# Altium schematic symbol library UCP.SchLib: 378 symbols (part 1 of 14)
Pins are listed as number, name and electrical type; pins without a type are passive.

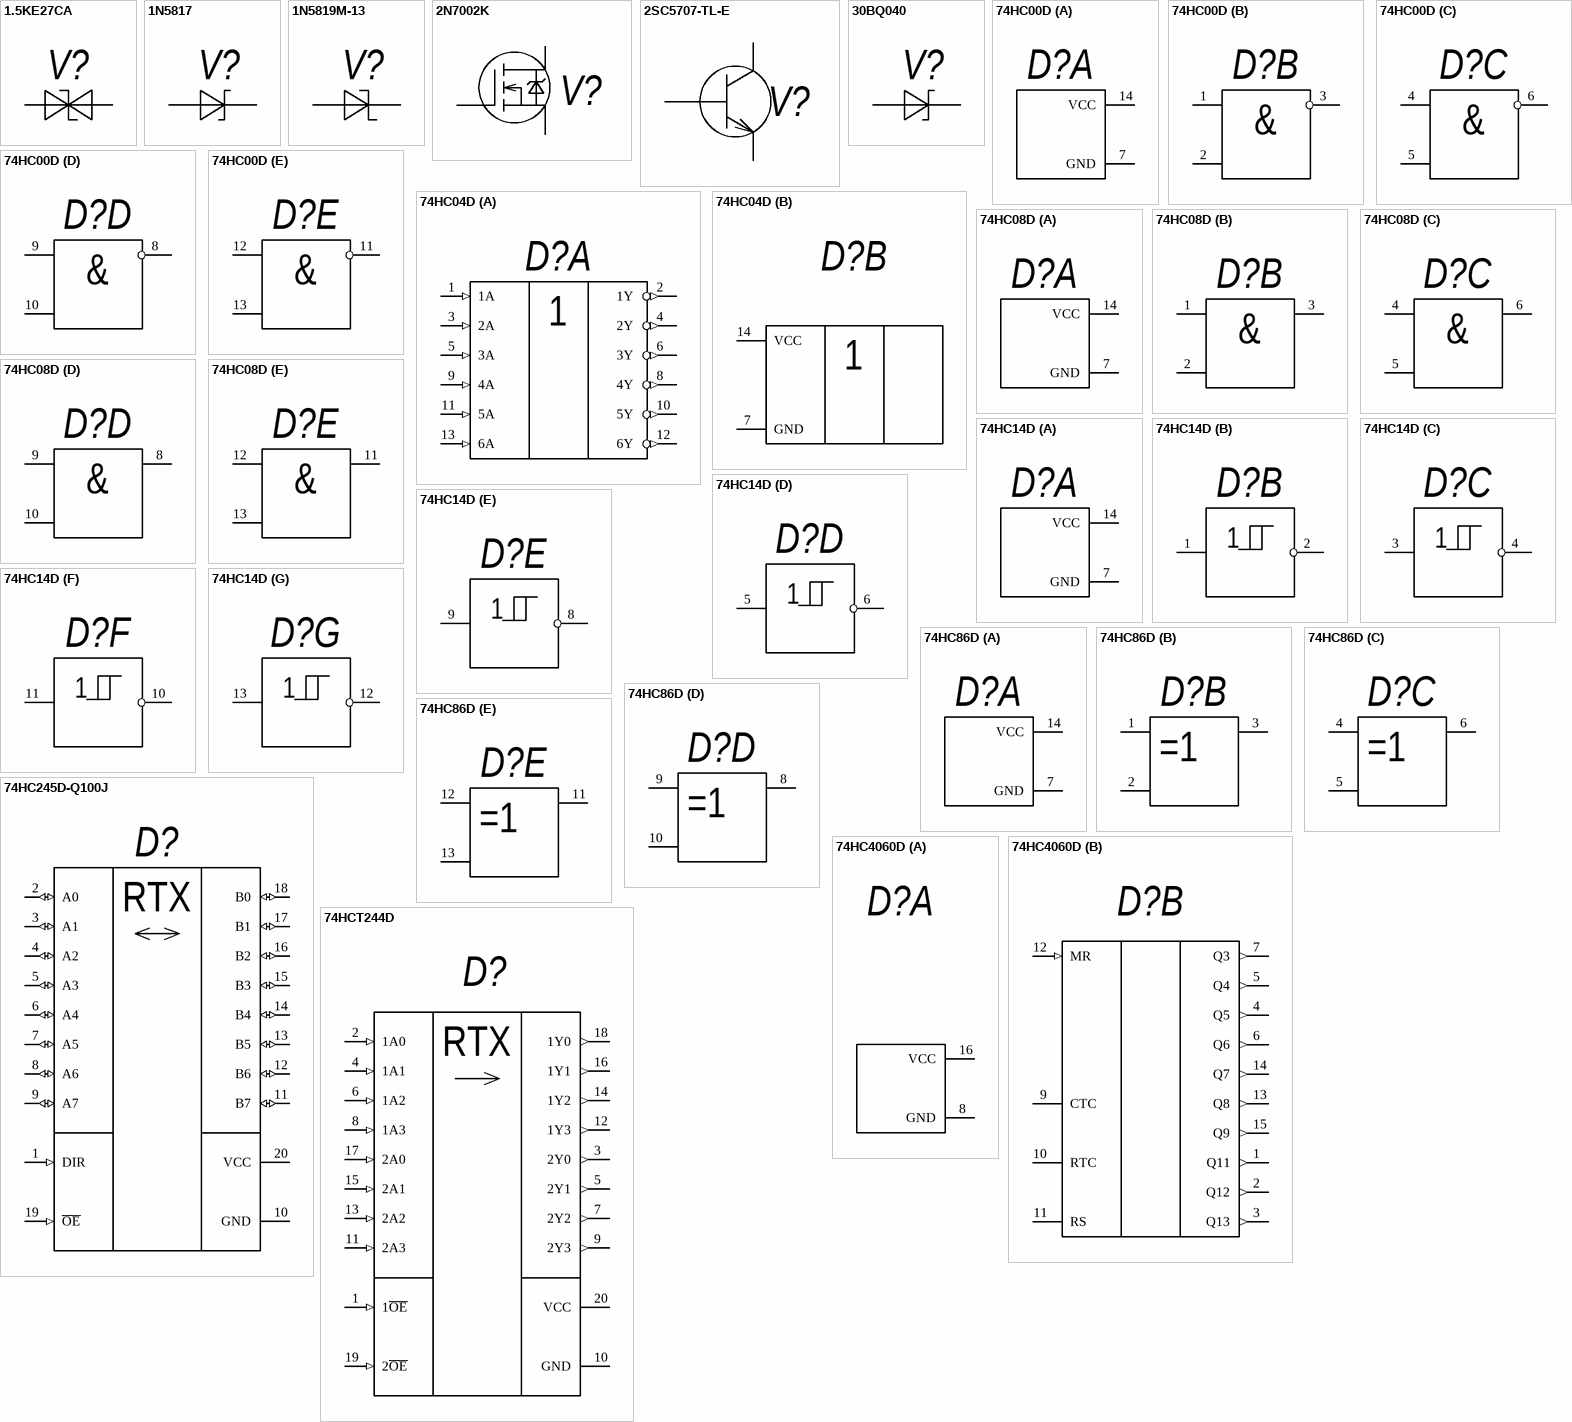
[diagram p0: symbols 1.5KE27CA to 74HCT244D]

## 1.5KE27CA
designator V?  (value not drawn)
TVS Diodes; Manufacturer 1: Littelfuse; Clamping Voltage: 37.5V; Peak Pulse Power: 1.5kW; Polarity: Bidirectional; Reverse Standoff Voltage: 23.1V; Breakdown Voltage: 25.7V; Peak Pulse Current: 40.5A; Test Current: 1mA; Max Reverse Leakage Current: 1uA; Element Configuration: Single; Number of Elements: 1; Power Line Protection: No; Diode Type: ZENER; ESD Protection: Yes; Max Power Dissipation: 6.5W; Max Breakdown Voltage: 28.4V; Value: 1.5KE27CA; Supplier 1: Arrow Electronics; Supplier Part Number 1: 1.5KE27CA; Manufacturer Part Number 1: 1.5KE27CA; RoHS: Yes; Category: TVS Diodes; Stock 1: 48; Pricing 1: 1=0,18400, 10=0,18040, 25=0,15920 (USD); Mount: THT; Case/Package: DO-201; Number of Pins: 2; Min Operating Temperature: -55°C; Max Operating Temperature: 175°C; Packaging: Tape and Reel; Package Quantity: 1200; Max Surge Current: 40.5A; Min Breakdown Voltage: 25.7V; Operating Supply Voltage: 23.1V; Direction: Bidirectional; Reverse Breakdown Voltage: 25.7V; Number of Bidirectional Channels: 1; Leakage Current: 1uA; Resistor Type: Zener; Series: 1.5KE; Termination: Axial; Number of Channels: 1; Power Dissipation: 6.5W; Diameter: 5.3mm; Length: 9.5mm; RoHS Compliant: Yes; Lead Free: Lead Free; REACH SVHC: No SVHC; ComponentLink1URL: https://datasheet.ciiva.com/28473/littelfuse-tvs-diode-1-5ke-28473077.pdf?src-supplier=Element14; ComponentLink1Description: https://datasheet.ciiva.com/28473/littelfuse-tvs-diode-1-5ke-28473077.pdf?src-supplier=Element14; ComponentLink2URL: https://datasheet.ciiva.com/332/littelfuse-tvs-diode-1-5ke-datasheet-pdf-332484.pdf?src-supplier=Digi-Key; ComponentLink2Description: https://datasheet.ciiva.com/332/littelfuse-tvs-diode-1-5ke-datasheet-pdf-332484.pdf?src-supplier=Digi-Key; ComponentLink3URL: https://datasheet.ciiva.com/332/littelfuse-tvs-diode-1-5ke-datasheet-pdf-332485.pdf?src-supplier=Digi-Key; ComponentLink3Description: https://datasheet.ciiva.com/332/littelfuse-tvs-diode-1-5ke-datasheet-pdf-332485.pdf?src-supplier=Digi-Key; ComponentLink4URL: https://datasheet.ciiva.com/1275/littelfuse-tvs-diode-1-5ke-1275437.pdf?src-supplier=Element14; ComponentLink4Description: https://datasheet.ciiva.com/1275/littelfuse-tvs-diode-1-5ke-1275437.pdf?src-supplier=Element14; Type: Диод
footprint DIONPAD1750W101L950D530 (Diode, Non-polarized, Axial; 17.50 mm Pitch X 1.015 mm W 9.50 mm L X 5.30 mm Dia. body)
pins: A, C

## 1N5817
designator V?  (value not drawn)
DIODE SCHOTTKY 40V 1A MELF; Manufacturer 1: Diodes; Manufacturer Part Number 1: 1N5819M-13; Forward Voltage: 900mV; Element Configuration: Single; Peak Non-Repetitive Surge Current: 25A; Reverse Recovery Time: 3us; Value: 5817; Supplier 1: Arrow Electronics; RoHS: No; Category: Rectifier Diodes; Mount: SMT; Case/Package: SOD-80; Number of Pins: 2; Min Operating Temperature: -60°C; Max Operating Temperature: 125°C; Packaging: Tape and Reel; Average Rectified Current: 1A; Max Reverse Voltage (DC): 40V; Series: -; Voltage Rating (DC): 40V; Current Rating: 1A; RoHS Compliant: No; Lead Free: Exempt; ComponentLink1URL: https://datasheet.ciiva.com/925/1n5817m-5818m-5819m-925412.pdf?src-supplier=Digi-Key; ComponentLink1Description: https://datasheet.ciiva.com/925/1n5817m-5818m-5819m-925412.pdf?src-supplier=Digi-Key; Supplier Part Number 1: 1N5819M-13; Supplier 2: Newark; Supplier Part Number 2: 38C7700; Type: Диод
footprint DIOMELF350X164L52N (Diode, Metal Electrode Leadless Face (MELF); 3.50 mm L X 1.645 mm Dia body)
pins: A, C

## 1N5819M-13
designator V?, comment Обозначение при заказе  (value not drawn)
DIODE SCHOTTKY 40V 1A MELF; Manufacturer 1: Diodes; Manufacturer Part Number 1: 1N5819M-13; Forward Voltage: 900mV; Element Configuration: Single; Peak Non-Repetitive Surge Current: 25A; Reverse Recovery Time: 3us; Value: 5819; Supplier 1: Arrow Electronics; RoHS: No; Category: Rectifier Diodes; Mount: SMT; Case/Package: SOD-80; Number of Pins: 2; Min Operating Temperature: -60°C; Max Operating Temperature: 125°C; Packaging: Tape and Reel; Average Rectified Current: 1A; Max Reverse Voltage (DC): 40V; Series: -; Voltage Rating (DC): 40V; Current Rating: 1A; RoHS Compliant: No; Lead Free: Exempt; ComponentLink1URL: https://datasheet.ciiva.com/925/1n5817m-5818m-5819m-925412.pdf?src-supplier=Digi-Key; ComponentLink1Description: https://datasheet.ciiva.com/925/1n5817m-5818m-5819m-925412.pdf?src-supplier=Digi-Key; Supplier Part Number 1: 1N5819M-13; Type: Диод
footprint DIOMELF350X164L52N (Diode, Metal Electrode Leadless Face (MELF); 3.50 mm L X 1.645 mm Dia body)
pins: A, C

## 2N7002K
designator V?  (value not drawn)
N-Channel 60 V (D-S) MOSFET; Case/Package: SOT-23-3; Mount: SMT; Type: Транзистор; Value: 2N7002K
footprint SOT23-3P95_240X110L25X60N (Small Outline Transistor (SOT23), 0.95 mm pitch; 3 pin, 2.90 mm L X 1.30 mm W X 1.10 mm H body)
footprint SOT23-3P95_240X110L30X43N (Small Outline Transistor (SOT23), 0.95 mm pitch; 3 pin, 2.90 mm L X 1.30 mm W X 1.10 mm H body)
pins: 1 G, 2 S, 3 D

## 2SC5707-TL-E
designator V?  (value not drawn)
nPN Bipolar Transistor 50V 8A; Manufacturer 1: Diodes; Manufacturer Part Number 1: MMBT4401-7-F; Max Power Dissipation: 300mW; Collector Emitter Voltage (VCEO): 40V; Max Collector Current: 600mA; Collector Base Voltage (VCBO): 60V; Emitter Base Voltage (VEBO): 6V; Element Configuration: Single; Gain Bandwidth Product: 250MHz; hFE Min: 100; Power Dissipation: 310mW; Collector-emitter Voltage-Max: 750mV; Number of Elements: 1; ComponentLink1URL: https://assets.nexperia.com/documents/data-sheet/BCP56_BCX56_BC56PA.pdf?src-supplier=Digi-Key; ComponentLink1Description: https://assets.nexperia.com/documents/data-sheet/BCP56_BCX56_BC56PA.pdf?src-supplier=Digi-Key; Case/Package: TO-252; Mount: SMT; Type: Транзистор; Value: 2SC5707; RoHS 1: Yes; Category: BJTs; Stock 1: 42810; Pricing 1: 5=0,15400, 10=0,14600, 100=0,07920, 500=0,04950 (EUR); Number of Pins: 4; Weight: 0.000282oz; Contact Plating: Tin,Matte; Min Operating Temperature: -55°C; Max Operating Temperature: 150°C; Packaging: Tape and Reel; Polarity: NPN; Collector Emitter Breakdown Voltage: 40V; Package Quantity: 3000; Voltage Rating (DC): 40V; Transition Frequency: 250MHz; Series: Automotive, AEC-Q101; Frequency: 250MHz; Collector Emitter Saturation Voltage: 750mV; Max Breakdown Voltage: 40V; Max Frequency: 250MHz; Continuous Collector Current: 600mA; Length: 3.05mm; Width: 1.4mm; Height: 1mm; Radiation Hardening: No; Lead Free: Lead Free; RoHS Compliant: Yes; Reach SVHC Compliant: Yes; ComponentLink2URL: https://datasheet.ciiva.com/15139/getdatasheetpartid-91436-15139165.pdf?src-supplier=Verical; ComponentLink2Description: https://datasheet.ciiva.com/15139/getdatasheetpartid-91436-15139165.pdf?src-supplier=Verical; ComponentLink3URL: https://datasheet.ciiva.com/11201/ds30039-11201820.pdf?src-supplier=Avnet; ComponentLink3Description: https://datasheet.ciiva.com/11201/ds30039-11201820.pdf?src-supplier=Avnet; ComponentLink4URL: https://datasheet.ciiva.com/16199/ds30039-16199054.pdf?src-supplier=Future+Electronics; ComponentLink4Description: https://datasheet.ciiva.com/16199/ds30039-16199054.pdf?src-supplier=Future+Electronics; ComponentLink5URL: https://datasheet.ciiva.com/972/ds30039-972548.pdf?src-supplier=Digi-Key; ComponentLink5Description: https://datasheet.ciiva.com/972/ds30039-972548.pdf?src-supplier=Digi-Key; ComponentLink6URL: https://datasheet.ciiva.com/972/ds30039-972549.pdf?src-supplier=Digi-Key; ComponentLink6Description: https://datasheet.ciiva.com/972/ds30039-972549.pdf?src-supplier=Digi-Key; ComponentLink7URL: https://datasheet.ciiva.com/972/ds30039-972547.pdf?src-supplier=Digi-Key; ComponentLink7Description: https://datasheet.ciiva.com/972/ds30039-972547.pdf?src-supplier=Digi-Key; Supplier 1: Farnell; Supplier Part Number 1: 2627952; Supplier 2: Farnell; Supplier Part Number 2: 2627952RL; Supplier 3: Avnet; Supplier Part Number 3: 2SC5707-TL-E; Supplier 4: Newark; Supplier Part Number 4: 99AC6863
footprint DPAK4P229_990X238L159X76T520X546N (DPAK, 2.29 mm pitch; 2 pin, 6.095 mm L X 6.54 mm W X 2.38 mm H body)
pins: 1 B, 3 E, 4 C

## 30BQ040
designator V?  (value not drawn)
DIODE SCHOTTKY 40V 3A MELF; Mount: SMT; Case/Package: SMC; ComponentLink1URL: https://datasheet.ciiva.com/925/1n5817m-5818m-5819m-925412.pdf?src-supplier=Digi-Key; ComponentLink1Description: https://datasheet.ciiva.com/925/1n5817m-5818m-5819m-925412.pdf?src-supplier=Digi-Key; Type: Диод; Value: 30BQ040; Supplier 1: Rs; Supplier Part Number 1: 6880512P; Supplier 2: Farnell; Supplier Part Number 2: 2630386
footprint DIOM794X590X262L114X305M (Diode, Molded Body; 6.855 mm L X 5.905 mm W X 2.62 mm H body)
pins: A, C

## 74HC00D
designator D?  (value not drawn)
IC GATE NAND 4CH 2-INP 14-SOIC; Manufacturer 1: Texas Instruments; Manufacturer Part Number 1: SN74HC00DR; Propagation Delay: 15ns; Output Current: 25mA; Logic Function: NAND GATE; Max Supply Voltage: 6V; Min Supply Voltage: 2V; Number of Circuits: 4; Quiescent Current: 2uA; High Level Output Current: -5.2mA; Low Level Output Current: 5.2mA; Number of Inputs: 2; Number of Outputs: 1; Operating Supply Voltage: 5V; Turn-On Delay Time: 23ns; Schmitt Trigger Input: No; Type: Микросхема; Value: 74HC00; Supplier 1: Mouser; Supplier Part Number 1: 595-SN74HC00DR; RoHS 1: Yes; Category: Logic Gates; Pricing 1: 1=0,41000, 10=0,33400, 50=0,33400, 100=0,20600, 1000=0,12800, 10000=0,11700 (USD); Mount: SMT; Case/Package: SOIC-14; Number of Pins: 14; Weight: 0.004318oz; Contact Plating: Tin; Min Operating Temperature: -40°C; Max Operating Temperature: 85°C; Packaging: Tape and Reel; Number of Gates: 4; Package Quantity: 1; Number of Elements: 4; Number of Input Lines: 2; Number of Output Lines: 1; Number of Bits: 4; Length: 8.65mm; Width: 3.91mm; Height: 1.58mm; Radiation Hardening: No; RoHS Compliant: Yes; Lead Free: Lead Free; REACH SVHC: No SVHC; ComponentLink1URL: https://datasheet.ciiva.com/7358/sn54hc00-7358904.pdf?src-supplier=Newark; ComponentLink1Description: https://datasheet.ciiva.com/7358/sn54hc00-7358904.pdf?src-supplier=Newark; ComponentLink2URL: https://datasheet.ciiva.com/34301/914531-34301752.pdf?src-supplier=Jameco; ComponentLink2Description: https://datasheet.ciiva.com/34301/914531-34301752.pdf?src-supplier=Jameco; ComponentLink3URL: https://datasheet.ciiva.com/15090/getdatasheetpartid-90695-15090677.pdf?src-supplier=Verical; ComponentLink3Description: https://datasheet.ciiva.com/15090/getdatasheetpartid-90695-15090677.pdf?src-supplier=Verical; ComponentLink4URL: https://datasheet.ciiva.com/46393/1882686-46393799.pdf?src-supplier=Element14; ComponentLink4Description: https://datasheet.ciiva.com/46393/1882686-46393799.pdf?src-supplier=Element14; ComponentLink5URL: https://datasheet.ciiva.com/1864/sn74hc00-1864711.pdf?src-supplier=Digi-Key; ComponentLink5Description: https://datasheet.ciiva.com/1864/sn74hc00-1864711.pdf?src-supplier=Digi-Key; ComponentLink6URL: https://datasheet.ciiva.com/1864/sn74hc00-1864710.pdf?src-supplier=Digi-Key; ComponentLink6Description: https://datasheet.ciiva.com/1864/sn74hc00-1864710.pdf?src-supplier=Digi-Key; ComponentLink7URL: https://datasheet.ciiva.com/1864/sn74hc00-1864712.pdf?src-supplier=Digi-Key; ComponentLink7Description: https://datasheet.ciiva.com/1864/sn74hc00-1864712.pdf?src-supplier=Digi-Key; ComponentLink8URL: https://datasheet.ciiva.com/14290/sn54hc00-sp-14290488.pdf?src-supplier=Avnet; ComponentLink8Description: https://datasheet.ciiva.com/14290/sn54hc00-sp-14290488.pdf?src-supplier=Avnet; ComponentLink9URL: https://datasheet.ciiva.com/14290/sn54hc00-sp-14290486.pdf?src-supplier=Avnet; ComponentLink9Description: https://datasheet.ciiva.com/14290/sn54hc00-sp-14290486.pdf?src-supplier=Avnet
footprint SOIC14P127_865X600X175L83X42N (Small Outline IC (SOIC), 1.27 mm pitch; 14 pin, 8.65 mm L X 3.90 mm W X 1.75 mm H body)
footprint SOIC14P127_865X600X175L65X42N (Small Outline IC (SOIC), 1.27 mm pitch; 14 pin, 8.65 mm L X 3.90 mm W X 1.75 mm H body)
part A pins: 7 GND (power) "Ground (0 V)", 14 VCC (power) "Supply Voltage"
part B pins: 1 1A "Data Input", 2 1B "Data Input", 3 1Y "Data Output"
part C pins: 4 2A "Data Input", 5 2B "Data Input", 6 2Y "Data Output"
part D pins: 8 3Y "Data Output", 9 3A "Data Input", 10 3B "Data Input"
part E pins: 11 4Y "Data Output", 12 4A "Data Input", 13 4B "Data Input"
part B text: &
part C text: &
part D text: &
part E text: &

## 74HC04D
designator D?, comment 74HC04D,653  (value not drawn)
The 74HC04; 74HCT04 is a hex inverter; Manufacturer 1: Nexperia; Type: Микросхема; ComponentLink1URL: https://datasheet.ciiva.com/15127/getdatasheetpartid-107342-15127132.pdf?src-supplier=Verical; ComponentLink1Description: https://datasheet.ciiva.com/15127/getdatasheetpartid-107342-15127132.pdf?src-supplier=Verical; ComponentLink2URL: https://datasheet.ciiva.com/2980/74hc-hct4067-2980453.pdf?src-supplier=Avnet; ComponentLink2Description: https://datasheet.ciiva.com/2980/74hc-hct4067-2980453.pdf?src-supplier=Avnet; ComponentLink3URL: https://datasheet.ciiva.com/16637/74hc-hct4067-16637879.pdf?src-supplier=Avnet+Europe; ComponentLink3Description: https://datasheet.ciiva.com/16637/74hc-hct4067-16637879.pdf?src-supplier=Avnet+Europe; Supplier 1: Arrow Electronics; Supplier Part Number 1: 74HC04D,653; Manufacturer Part Number 1: 74HC04D,653; RoHS: Yes; Category: Logic Gates; Stock 1: 10000; Pricing 1: 2500=0,08210 (USD); RoHS Compliant: Yes; Case/Package: SOIC-14; Mount: SMT; Value: 74HC04
footprint SOIC14P127_865X600X175L83X42N (Small Outline IC (SOIC), 1.27 mm pitch; 14 pin, 8.65 mm L X 3.90 mm W X 1.75 mm H body)
footprint SOIC14P127_865X600X175L65X42N (Small Outline IC (SOIC), 1.27 mm pitch; 14 pin, 8.65 mm L X 3.90 mm W X 1.75 mm H body)
part A pins: 1 1A (in) "data input", 2 1Y (out) "Data Output", 3 2A (in) "data input", 4 2Y (out) "Data Output", 5 3A (in) "data input", 6 3Y (out) "Data Output", 8 4Y (out) "Data Output", 9 4A (in) "data input", 10 5Y (out) "Data Output", 11 5A (in) "data input", 12 6Y (out) "Data Output", 13 6A (in) "data input"
part B pins: 7 GND (power) "Ground (0 V)", 14 VCC (power) "Supply Voltage"

## 74HC08D
designator D?  (value not drawn)
IC GATE AND 4CH 2-INP 14-SOIC; Manufacturer 1: Texas Instruments; Manufacturer Part Number 1: SN74HC08DR; Max Supply Voltage: 6V; Min Supply Voltage: 2V; Output Current: 25mA; Propagation Delay: 17ns; Number of Gates: 4; Low Level Output Current: 5.2mA; High Level Output Current: -5.2mA; Logic Function: AND GATE; Quiescent Current: 2uA; Number of Inputs: 2; Number of Outputs: 1; Operating Supply Voltage: 5V; Turn-On Delay Time: 21ns; Type: Микросхема; Value: 74HC08; Supplier 1: Mouser; Supplier Part Number 1: 595-SN74HC08DR; RoHS 1: Yes; Category: Logic Gates; Pricing 1: 1=0,41000, 10=0,33400, 50=0,33400, 100=0,20600, 500=0,17100, 1000=0,12800, 2500=0,11700, 10000=0,11700 (USD); Mount: SMT; Case/Package: SOIC-14; Number of Pins: 14; Weight: 0.004318oz; Contact Plating: Gold; Min Operating Temperature: -40°C; Max Operating Temperature: 85°C; Packaging: Tape and Reel; Number of Circuits: 4; Package Quantity: 1; Number of Elements: 4; Number of Input Lines: 2; Number of Output Lines: 1; Number of Bits: 4; Radiation Hardening: No; Lead Free: Lead Free; RoHS Compliant: Yes; REACH SVHC: No SVHC; ComponentLink1URL: https://datasheet.ciiva.com/46393/1882760-46393782.pdf?src-supplier=Element14; ComponentLink1Description: https://datasheet.ciiva.com/46393/1882760-46393782.pdf?src-supplier=Element14; ComponentLink2URL: https://datasheet.ciiva.com/46393/1882760-46393832.pdf?src-supplier=Element14; ComponentLink2Description: https://datasheet.ciiva.com/46393/1882760-46393832.pdf?src-supplier=Element14; ComponentLink3URL: https://datasheet.ciiva.com/1864/sn74hc08-1864669.pdf?src-supplier=Digi-Key; ComponentLink3Description: https://datasheet.ciiva.com/1864/sn74hc08-1864669.pdf?src-supplier=Digi-Key; ComponentLink4URL: https://datasheet.ciiva.com/1864/sn74hc08-1864668.pdf?src-supplier=Digi-Key; ComponentLink4Description: https://datasheet.ciiva.com/1864/sn74hc08-1864668.pdf?src-supplier=Digi-Key; ComponentLink5URL: https://datasheet.ciiva.com/1864/sn74hc08-1864670.pdf?src-supplier=Digi-Key; ComponentLink5Description: https://datasheet.ciiva.com/1864/sn74hc08-1864670.pdf?src-supplier=Digi-Key; ComponentLink6URL: https://datasheet.ciiva.com/7949/1882760-7949053.pdf?src-supplier=Element14; ComponentLink6Description: https://datasheet.ciiva.com/7949/1882760-7949053.pdf?src-supplier=Element14; ComponentLink7URL: https://datasheet.ciiva.com/14290/sn54hc08-sp-14290521.pdf?src-supplier=Avnet; ComponentLink7Description: https://datasheet.ciiva.com/14290/sn54hc08-sp-14290521.pdf?src-supplier=Avnet; ComponentLink8URL: https://datasheet.ciiva.com/14290/sn54hc08-sp-14290518.pdf?src-supplier=Avnet; ComponentLink8Description: https://datasheet.ciiva.com/14290/sn54hc08-sp-14290518.pdf?src-supplier=Avnet
footprint SOIC14P127_865X600X175L83X42N (Small Outline IC (SOIC), 1.27 mm pitch; 14 pin, 8.65 mm L X 3.90 mm W X 1.75 mm H body)
footprint SOIC14P127_865X600X175L65X42N (Small Outline IC (SOIC), 1.27 mm pitch; 14 pin, 8.65 mm L X 3.90 mm W X 1.75 mm H body)
part A pins: 7 GND (power) "Ground (0 V)", 14 VCC (power) "Supply Voltage"
part B pins: 1 1A "Data Input", 2 1B "Data Input", 3 1Y "Data Output"
part C pins: 4 2A "Data Input", 5 2B "Data Input", 6 2Y "Data Output"
part D pins: 8 3Y "Data Output", 9 3A "Data Input", 10 3B "Data Input"
part E pins: 11 4Y "Data Output", 12 4A "Data Input", 13 4B "Data Input"
part B text: &
part C text: &
part D text: &
part E text: &

## 74HC14D
designator D?, comment 74HC14D,653  (value not drawn)
Inverter IC 6 Channel Schmitt Trigger 14-SO; Manufacturer 1: Nexperia; Type: Микросхема; Value: 74HC14; Supplier 1: Newark; Supplier Part Number 1: 26M7759; Manufacturer Part Number 1: 74HC14D,653; RoHS 1: Yes; Category: Logic Gates; Stock 1: 70959; Pricing 1: 1=0,17200 (USD); RoHS Compliant: Yes; ComponentLink1URL: http://www.farnell.com/datasheets/2000343.pdf?src-supplier=Farnell; ComponentLink1Description: http://www.farnell.com/datasheets/2000343.pdf?src-supplier=Farnell; ComponentLink2URL: https://assets.nexperia.com/documents/data-sheet/74HC_HCT14.pdf?src-supplier=Digi-Key; ComponentLink2Description: https://assets.nexperia.com/documents/data-sheet/74HC_HCT14.pdf?src-supplier=Digi-Key; ComponentLink3URL: http://www.farnell.com/datasheets/2000343.pdf?src-supplier=Newark; ComponentLink3Description: http://www.farnell.com/datasheets/2000343.pdf?src-supplier=Newark; Case/Package: SOIC-14; Mount: SMT
footprint SOIC14P127_865X600X175L83X42N (Small Outline IC (SOIC), 1.27 mm pitch; 14 pin, 8.65 mm L X 3.90 mm W X 1.75 mm H body)
footprint SOIC14P127_865X600X175L65X42N (Small Outline IC (SOIC), 1.27 mm pitch; 14 pin, 8.65 mm L X 3.90 mm W X 1.75 mm H body)
part A pins: 7 GND (power) "Ground (0 V)", 14 VCC (power) "Supply Voltage"
part B pins: 1 1A "Data Input", 2 1Y "Назначение вывода"
part C pins: 3 2A "Data Input", 4 2Y "Data Output"
part D pins: 5 3A "Data Input", 6 3Y "Data Output"
part E pins: 8 4Y "Data Output", 9 4A "Data Input"
part F pins: 10 5Y "Data Output", 11 5A "Data Input"
part G pins: 12 6Y "Data Output", 13 6A "Data Input"

## 74HC86D
designator D?  (value not drawn)
LOGIC, XOR GATE, QUAD, SOIC-14; Logic Type: XOR Gate; No. of Inputs: 2; Supply Vol; Manufacturer 1: Philips; Manufacturer Part Number 1: 74HC86D,653; Category 1: Logic Gates; Number of Gates: 4; Output Current: 5.2mA; Type: Микросхема; Value: 74HC86; Supplier 1: Avnet; Supplier Part Number 1: 74HC86D653; RoHS 1: No; Case/Package: SOIC-14; Number of Pins: 14; Logic Function: XOR GATE; Packaging: Tape and Reel; REACH SVHC: No SVHC; Lead Free: Lead Free; Mount: SMT
footprint SOIC14P127_865X600X175L83X42N (Small Outline IC (SOIC), 1.27 mm pitch; 14 pin, 8.65 mm L X 3.90 mm W X 1.75 mm H body)
footprint SOIC14P127_865X600X175L65X42N (Small Outline IC (SOIC), 1.27 mm pitch; 14 pin, 8.65 mm L X 3.90 mm W X 1.75 mm H body)
part A pins: 7 GND (power) "Ground (0 V)", 14 VCC (power) "Supply Voltage"
part B pins: 1 1A "Data Input", 2 1B "Data Input", 3 1Y "Data Output"
part C pins: 4 2A "Data Input", 5 2B "Data Input", 6 2Y "Data Output"
part D pins: 8 3Y "Data Output", 9 3A "Data Input", 10 3B "Data Input"
part E pins: 11 4Y "Data Output", 12 4A "Data Input", 13 4B "Data Input"

## 74HC245D-Q100J
designator D?  (value not drawn)
Octal bus transceiver; 3-state; Type: Микросхема; Supplier 1: Digi-Key; Supplier 2: Digi-Key; Supplier 3: Mouser; Supplier Part Number 1: 296-1197-1-ND; Supplier Part Number 2: 296-1197-5-ND; Supplier Part Number 3: 771-74HC245DQ100J; Case/Package: SOIC-20; Mount: SMT; Value: 74HC245
footprint SOIC20P127_1280X1031X265L83X41N (Small Outline IC (SOIC), 1.27 mm pitch; 20 pin, 12.80 mm L X 7.50 mm W X 2.65 mm H body)
pins: 1 DIR (in) "Управление направлением", 2 A0 (io) "Канал 1", 3 A1 (io) "Управление направлением", 4 A2 (io) "Управление направлением", 5 A3 (io) "Управление направлением", 6 A4 (io) "Управление направлением", 7 A5 (io) "Управление направлением", 8 A6 (io) "Управление направлением", 9 A7 (io) "Управление направлением", 10 GND (power), 11 B7 (io) "GND", 12 B6 (io) "GND", 13 B5 (io) "GND", 14 B4 (io) "GND", 15 B3 (io) "GND", 16 B2 (io) "GND", 17 B1 (io) "GND", 18 B0 (io) "GND", 19 ~{OE} (in) "GND", 20 VCC (power) "Vcc"
1 alternate drawing of the same symbol
text: RTX

## 74HC4060D
designator D?  (value not drawn)
NEXPERIA - 74HC4060D,652 - 14 STAGE BINARY RIPPLE COUNTER, SOIC-16; Manufacturer 1: NXP Semiconductors; Manufacturer Part Number 1: 74HC4060D652; Operating Supply Voltage: 5V; Number of Elements: 1; Propagation Delay: 450ns; Min Supply Voltage: 2V; Max Supply Voltage: 6V; Direction: Unidirectional; Number of Bits: 14; Frequency: 95MHz; Reset: Asynchronous; Clock Edge Trigger Type: Negative Edge; Type: Микросхема; Supplier 1: Allied Electronics; Supplier Part Number 1: 70012399; RoHS 1: Yes; Category: Counters; Case/Package: SOIC-16; Number of Pins: 16; Weight: 0.25lb; Min Operating Temperature: -40°C; Max Operating Temperature: 125°C; Packaging: Bulk; Package Quantity: 1000; Logic Function: Counter; Number of Bits per Element: 14; Turn-On Delay Time: 450ns; Technology: CMOS; Number of Functions: 1; Supply Voltage-Nom: 6V; Length: 10mm; Width: 4mm; Height: 1.45mm; Radiation Hardening: No; Lead Free: Lead Free; ComponentLink1URL: https://datasheet.ciiva.com/16215/74hc-hct4060-16215998.pdf?src-supplier=Future+Electronics; ComponentLink1Description: https://datasheet.ciiva.com/16215/74hc-hct4060-16215998.pdf?src-supplier=Future+Electronics; Mount: SMT; Value: 74HC4060
footprint SOIC16P127_990X600X175L83X42N (Small Outline IC (SOIC), 1.27 mm pitch; 16 pin, 9.90 mm L X 3.90 mm W X 1.75 mm H body)
footprint SOIC16P127_990X600X175L65X42N (Small Outline IC (SOIC), 1.27 mm pitch; 16 pin, 9.90 mm L X 3.90 mm W X 1.75 mm H body)
part A pins: 8 GND (power) "Ground (0 V)", 16 VCC (power) "Supply Voltage"
part B pins: 1 Q11 (out) "Counter Output", 2 Q12 (out) "Counter Output", 3 Q13 (out) "Counter Output", 4 Q5 (out) "Counter Output", 5 Q4 (out) "Counter Output", 6 Q6 (out) "Counter Output", 7 Q3 (out) "Counter Output", 9 CTC "External Capacitor Connection", 10 RTC "External Resistor Connection", 11 RS "Clock Input/Oscillator Pin", 12 MR (in) "Master Reset Input (Active HIGH)", 13 Q8 (out) "Counter Output", 14 Q7 (out) "Counter Output", 15 Q9 (out) "Counter Output"

## 74HCT244D
designator D?  (value not drawn)
Octal buffer/line driver; 3-state; Type: Микросхема; Value: 74HTC244; Case/Package: SOIC-20; Mount: SMT; Supplier 1: Rs; Supplier Part Number 1: 1707989
footprint SOIC20P127_1280X1031X265L83X41N (Small Outline IC (SOIC), 1.27 mm pitch; 20 pin, 12.80 mm L X 7.50 mm W X 2.65 mm H body)
footprint SOIC20P127_1280X1031X265L65X42N (Small Outline IC (SOIC), 1.27 mm pitch; 20 pin, 12.80 mm L X 7.50 mm W X 2.65 mm H body)
pins: 1 1~{OE} (in) "output enable input (active LOW)", 2 1A0 (in) "Канал 1", 3 2Y0 (out) "bus output", 4 1A1 (in) "Управление направлением", 5 2Y1 (out) "bus output", 6 1A2 (in) "data input", 7 2Y2 (out) "bus output", 8 1A3 (in) "data input", 9 2Y3 (out) "bus output", 10 GND (power), 11 2A3 (in) "GND", 12 1Y3 (out) "bus output", 13 2A2 (in) "GND", 14 1Y2 (out) "bus output", 15 2A1 (in) "GND", 16 1Y1 (out) "bus output", 17 2A0 (in) "data input", 18 1Y0 (out) "bus output", 19 2~{OE} (in) "output enable input (active LOW)", 20 VCC (power) "Vcc"
text: RTX

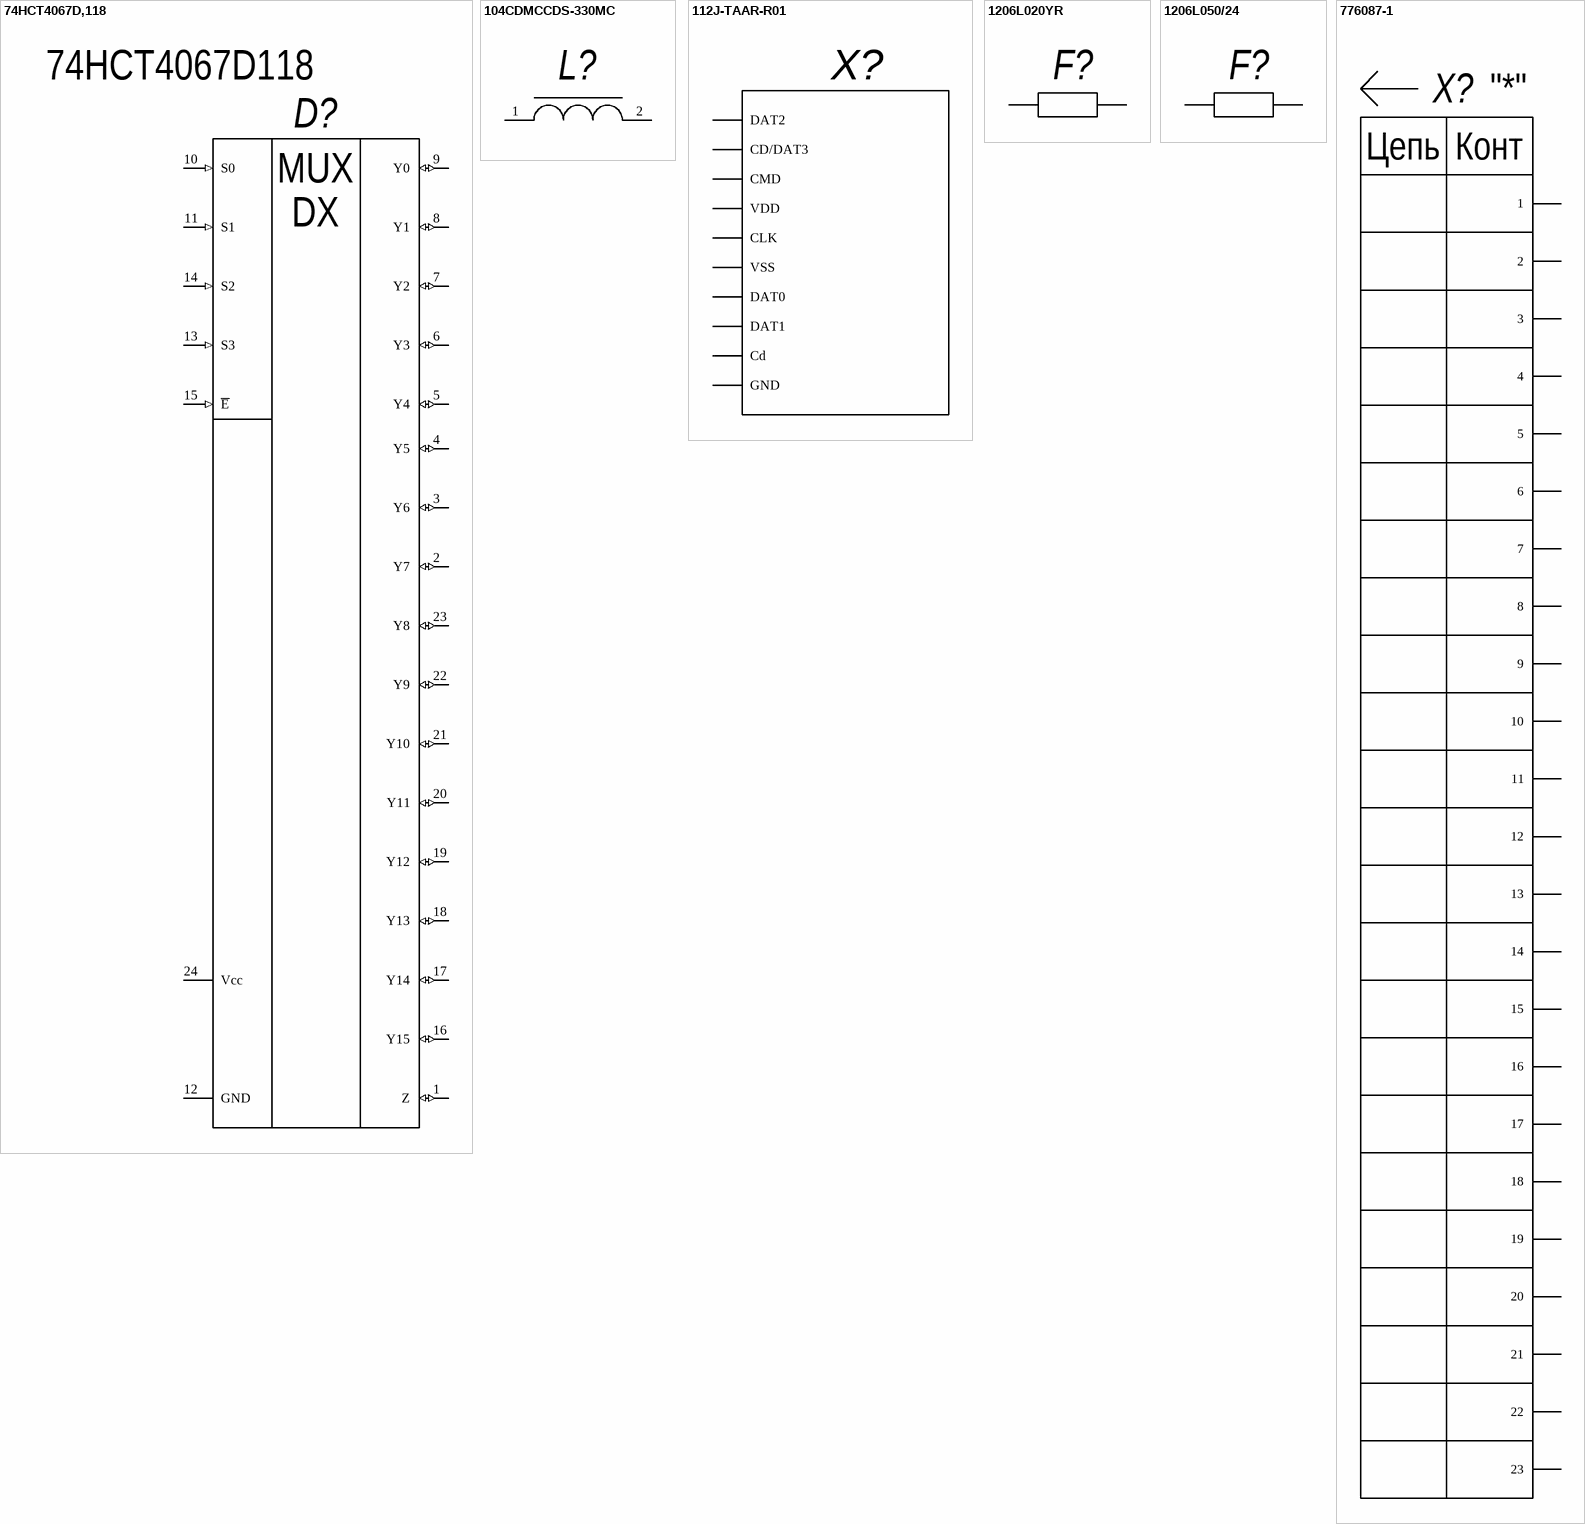
[diagram p1: symbols 74HCT4067D,118 to 776087-1]

## 74HCT4067D,118
designator D?  Supplier Part Number 2: 74HCT4067D118  (hidden comment: 74HCT4067D,118)
16-channel analog multiplexer/demultiplexer; Manufacturer 1: NXP Semiconductors; Bandwidth: 100MHz; Propagation Delay: 9ns; Max Power Dissipation: 500mW; Number of Channels: 1; Min Supply Voltage: 4.5V; Operating Supply Voltage: 5V; Max Supply Voltage: 5.5V; On-State Resistance: 120R; Operating Supply Current: 8uA; Turn-On Delay Time: 65ns; Turn-Off Delay Time: 60ns; Number of Inputs: 16; Logic Function: Multiplexer,Demultiplexer; Supply Type: Single; Low Level Output Current: 25mA; Type: Микросхема; Value: 74HC4067; Supplier 1: Arrow Electronics; Manufacturer Part Number 1: 74HCT4067D,118; RoHS: Yes; Category: Decoders and Multiplexers; Mount: SMT; Case/Package: SOIC-24; Number of Pins: 24; Contact Plating: Gold; Min Operating Temperature: -40°C; Max Operating Temperature: 125°C; Packaging: Tape and Reel; Package Quantity: 1000; Number of Outputs: 1; Power Dissipation: 500mW; High Level Output Current: 25mA; Series: 74HCT; Number of Switches: 1; Radiation Hardening: No; RoHS Compliant: Yes; ComponentLink1URL: https://datasheet.ciiva.com/15127/getdatasheetpartid-107342-15127132.pdf?src-supplier=Verical; ComponentLink1Description: https://datasheet.ciiva.com/15127/getdatasheetpartid-107342-15127132.pdf?src-supplier=Verical; ComponentLink2URL: https://datasheet.ciiva.com/2980/74hc-hct4067-2980453.pdf?src-supplier=Avnet; ComponentLink2Description: https://datasheet.ciiva.com/2980/74hc-hct4067-2980453.pdf?src-supplier=Avnet; ComponentLink3URL: https://datasheet.ciiva.com/16637/74hc-hct4067-16637879.pdf?src-supplier=Avnet+Europe; ComponentLink3Description: https://datasheet.ciiva.com/16637/74hc-hct4067-16637879.pdf?src-supplier=Avnet+Europe; Supplier Part Number 1: 74HCT4067D,118; Supplier 2: Avnet; Manufacturer 2: NXP Semiconductors; Manufacturer Part Number 2: 74HCT4067D,118
footprint SOIC24P127_1540X1032X265L75X42 (SOIC, 24-Leads, Body 15,40x7,50mm, Pitch 1,27mm, IPC Medium Density)
pins: 1 Z (io) "common input/output", 2 Y7 (io) "independent input or output", 3 Y6 (io) "independent input or output", 4 Y5 (io) "independent input or output", 5 Y4 (io) "independent input or output", 6 Y3 (io) "independent input or output", 7 Y2 (io) "independent input or output", 8 Y1 (io) "independent input or output", 9 Y0 (io) "independent input or output", 10 S0 (in) "address input", 11 S1 (in) "address input", 12 GND (power) "ground (0 V)", 13 S3 (in) "address input", 14 S2 (in) "address input", 15 ~{E} (in) "enable input (active LOW)", 16 Y15 (io) "independent input or output", 17 Y14 (io) "independent input or output", 18 Y13 (io) "independent input or output", 19 Y12 (io) "independent input or output", 20 Y11 (io) "independent input or output", 21 Y10 (io) "independent input or output", 22 Y9 (io) "independent input or output", 23 Y8 (io) "independent input or output", 24 Vcc (power) "supply voltage"
text: MUX; DX

## 104CDMCCDS-330MC
designator L?  (value not drawn)
SMD Power Inductor 33uH ±20% 4.1A 92mOhm; Type: Катушка индуктивности; Value: SRP1265A; Core Material: Carbonyl Powder; Inductance: 22uH; Current Rating: 9A; Saturation Current: 12A; Shielding: Shielded; DC Resistance (DCR): 37mR; Self Resonant Frequency: 6MHz; Test Frequency: 100kHz; Case/Package: SMD-2; Mount: SMT; Manufacturer 2: Bourns; Manufacturer Part Number 2: SRP1265A-220M; RoHS 2: Yes; Category: Fixed Inductors; Stock 2: 2000; Pricing 2: 500=1,08, 2500=1,06, 5000=1,04 (EUR); Min Operating Temperature: -40°C; Max Operating Temperature: 150°C; Packaging: Cut Tape; Tolerance: 20%; Max DC Current: 9A; RMS Current (Irms): 9A; DC Current: 9A; Termination: SMD/SMT; Inductance Tolerance: 20%; Series: SRP1265A; Length: 0.531inch; Width: 0.492inch; Height: 6.2mm; Height - Seated (Max): 0.252inch; Depth: 12.8mm; Ratings: AEC-Q200; Reach SVHC Compliant: No; Military Standard: Not; RoHS Compliant: Yes; ComponentLink1URL: https://datasheet.ciiva.com/48685/srp1265a-48685099.pdf?src-supplier=Avnet; ComponentLink1Description: https://datasheet.ciiva.com/48685/srp1265a-48685099.pdf?src-supplier=Avnet; ComponentLink2URL: https://datasheet.ciiva.com/48685/srp1265a-48685101.pdf?src-supplier=Avnet; ComponentLink2Description: https://datasheet.ciiva.com/48685/srp1265a-48685101.pdf?src-supplier=Avnet; Supplier 1: Farnell; Supplier Part Number 1: 2786999
pins: 1 "Назначение вывода", 2 "Назначение вывода"

## 112J-TAAR-R01
designator X?, comment 112J-TDAR-R01  (value not drawn)
MicroSD card Holder; Value: 112J-TAAR; Case/Package: SMD-13 (+MECH-2); Mount: SMT; Type: Розетка
footprint 112J-TAAR-R01 (CARD HOLDER)
pins: 1 DAT2 "Назначение вывода", 2 CD/DAT3 "Назначение вывода", 3 CMD "Назначение вывода", 4 VDD "Назначение вывода", 5 CLK "Назначение вывода", 6 VSS "Назначение вывода", 7 DAT0 "Назначение вывода", 8 DAT1 "Назначение вывода", Cd "Назначение вывода", GND "Назначение вывода"

## 1206L020YR
designator F?  (value not drawn)
Resettable Fuse; Holding Current:200mA; Tripping Current:420mA; Initial Resistance Max:2.600ohm; Operating Voltage:24VDC; Series:1206L; PTC Fuse Case:1206; External Depth:0.75mm; Fuse Terminals:SMT Caps ;; Type: Предохранитель самовостаннавливающийся; Value: 0,2А; Supplier 1: Digi-Key; Supplier Part Number 1: F2109CT-ND; Case/Package: 1206; Mount: SMT
footprint FUSC320X165X100L50 (Fuse, Chip; 2 pin, 3.40 mm L X 1.80 mm W X 0.75 mm H body)
pins: 1, 2

## 1206L050/24
designator F?, comment 1206L050/24WR  (value not drawn)
Resettable Fuse; Holding Current:500mA; Tripping Current:1000mA; Initial Resistance Max:0.75ohm; Operating Voltage:24VDC; Series:1206L; PTC Fuse Case:1206; External Depth1.25mm; Fuse Terminals:SMT Caps ;; Manufacturer 1: Littelfuse; Type: Предохранитель самовостаннавливающийся; Value: 0,5А; Operating Supply Voltage: 6V; Resistance: 700mR; Max Current Rating: 100A; Power Dissipation: 600mW; Hold Current: 500mA; Trip Current: 1A; Time to Trip: 100ms; Approvals: cULus,TUV; Case/Package: 1206; Mount: SMT; Manufacturer 2: Littelfuse; Manufacturer Part Number 2: 1206L050YR; RoHS 2: Yes; Category: PTC Resettable Fuses; Stock 2: 10050; Pricing 2: 10=93,367, 50=80,418, 100=71,695, 500=54,248, 1000=47,978 (RUB); Case Code (Metric): 3216; Case Code (Imperial): 1206; Terminal Material: Copper; Min Operating Temperature: -40°C; Max Operating Temperature: 85°C; Packaging: Tape and Reel; Current Rating: 100A; Package Quantity: 4000; Voltage Rating: 6V; Termination: SMD/SMT; Voltage Rating (DC): 6V; Max Voltage Rating (DC): 6V; Working Voltage: 6V; Max Power Dissipation: 600mW; Series: 1206L; Length: 3.4mm; Width: 1.8mm; Height: 0.75mm; Reach SVHC Compliant: No; Lead Free: Lead Free; RoHS Compliant: Yes; ComponentLink1URL: https://datasheet.ciiva.com/16222/littelfuse-ptc-1206l-16222126.pdf?src-supplier=Future+Electronics; ComponentLink1Description: https://datasheet.ciiva.com/16222/littelfuse-ptc-1206l-16222126.pdf?src-supplier=Future+Electronics; ComponentLink2URL: https://datasheet.ciiva.com/14102/1206l-eng-datasheet-14102821.pdf?src-supplier=Distrelec; ComponentLink2Description: https://datasheet.ciiva.com/14102/1206l-eng-datasheet-14102821.pdf?src-supplier=Distrelec; ComponentLink3URL: https://datasheet.ciiva.com/1273/48531-1273621.pdf?src-supplier=Element14; ComponentLink3Description: https://datasheet.ciiva.com/1273/48531-1273621.pdf?src-supplier=Element14; ComponentLink4URL: https://datasheet.ciiva.com/22714/48531-22714584.pdf?src-supplier=Element14; ComponentLink4Description: https://datasheet.ciiva.com/22714/48531-22714584.pdf?src-supplier=Element14; ComponentLink5URL: https://datasheet.ciiva.com/22658/683946-22658200.pdf?src-supplier=Element14; ComponentLink5Description: https://datasheet.ciiva.com/22658/683946-22658200.pdf?src-supplier=Element14; ComponentLink6URL: https://datasheet.ciiva.com/46393/683946-46393034.pdf?src-supplier=Element14; ComponentLink6Description: https://datasheet.ciiva.com/46393/683946-46393034.pdf?src-supplier=Element14; ComponentLink7URL: https://datasheet.ciiva.com/325/littelfuse-ptc-1206l-325733.pdf?src-supplier=Digi-Key; ComponentLink7Description: https://datasheet.ciiva.com/325/littelfuse-ptc-1206l-325733.pdf?src-supplier=Digi-Key; ComponentLink8URL: https://datasheet.ciiva.com/325/littelfuse-ptc-1206l-325734.pdf?src-supplier=Digi-Key; ComponentLink8Description: https://datasheet.ciiva.com/325/littelfuse-ptc-1206l-325734.pdf?src-supplier=Digi-Key; ComponentLink9URL: https://datasheet.ciiva.com/325/littelfuse-ptc-1206l-325732.pdf?src-supplier=Digi-Key; ComponentLink9Description: https://datasheet.ciiva.com/325/littelfuse-ptc-1206l-325732.pdf?src-supplier=Digi-Key; Supplier 1: Farnell; Supplier Part Number 1: 4036481; Manufacturer Part Number 1: 1206L050/24WR; RoHS 1: Yes; Stock 1: 2352; Pricing 1: 1=1,49, 25=1,35, 50=1,12, 100=0,94, 250=0,91, 500=0,77, 1000=0,68 (EUR); Ratings: AEC-Q200; ComponentLink10URL: http://www.littelfuse.com/~/media/electronics/datasheets/resettable_ptcs/littelfuse_ptc_1206l_datasheet.pdf.pdf?src-supplier=Digi-Key; ComponentLink10Description: http://www.littelfuse.com/~/media/electronics/datasheets/resettable_ptcs/littelfuse_ptc_1206l_datasheet.pdf.pdf?src-supplier=Digi-Key
footprint FUSC320X165X100L50 (Fuse, Chip; 2 pin, 3.40 mm L X 1.80 mm W X 0.75 mm H body)
pins: 1, 2

## 776087-1
designator X?  Marck-2: "*"  (hidden comment: 776087-1)
AMPSEAL Series; 4mm Pitch 23 Way 3 Row Right Angle PCB Header; Solder Term; 8A; Manufacturer 1: TE Connectivity; Number of Terminals/Pins: 23; Current Rating: 17A; Gender: Male; Max Voltage Rating (AC): 250V; Sealable: Yes (With); Connector System: Wire-to-Device; Number of Ports: 1; Circuit Application: Power; PCB Mount Retention: With; Shielding: Unshielded; Primary Type: Rectangular; Pitch: 0.157inch; PCB Thickness: 0.062inch; Tab Thickness: 1.3mm; Case/Package: DIP-23 (+4 MECH); Mount: THT; Type: Вилка; Value: 776087-1; Marck-1: *; Supplier 1: Farnell; Supplier Part Number 1: 2293332; Manufacturer Part Number 1: 776087-1; RoHS 1: Yes; Category: Connectors; Stock 1: 106; Pricing 1: 1=12,15000, 10=11,15000, 25=10,30000, 100=10,03000, 250=9,66000, 500=9,29000 (EUR); Contact Plating: Tin; Contact Material: Brass; Color: Black; Housing Color: Black; Housing Material: Polybutylene; Contact Shape: Circular; Contact Finish - Mating: TIN; Insulation Material: PBT; Insulation Color: Black; Min Operating Temperature: -40°C; Max Operating Temperature: 221°C; Number of Rows: 3; Termination: Solder; Number of Contacts: 23; Packaging: Bulk; Package Quantity: 1; Fastening Type: Ramp; Number of Positions: 23; Orientation: Right Angle; Connector Type: Header; Series: Ampseal; Contact Type: Male Pin; Number of Signal Positions: 23; PCB Mount Alignment: Yes (With); Voltage Rating (AC): 250V; Length: 60.8mm; Width: 37.9mm; Row Spacing: 0.157inch; Depth: 37.9mm; Radiation Hardening: No; ELV: Compliant; Lead Free: Lead Free; Flammability Rating: UL94 V-0; RoHS Compliant: Yes; ComponentLink1URL: https://datasheet.ciiva.com/16403/eng-cd-776087-e4-16403016.pdf?src-supplier=Future+Electronics; ComponentLink1Description: https://datasheet.ciiva.com/16403/eng-cd-776087-e4-16403016.pdf?src-supplier=Future+Electronics; ComponentLink2URL: https://datasheet.ciiva.com/11747/0900766b80fa14ac-11747407.pdf?src-supplier=RSComponents; ComponentLink2Description: https://datasheet.ciiva.com/11747/0900766b80fa14ac-11747407.pdf?src-supplier=RSComponents; ComponentLink3URL: https://datasheet.ciiva.com/22649/1698943-22649488.pdf?src-supplier=Farnell; ComponentLink3Description: https://datasheet.ciiva.com/22649/1698943-22649488.pdf?src-supplier=Farnell; ComponentLink4URL: https://datasheet.ciiva.com/30205/eng-cs-1654285-ampseal-sealed-nector-0911-30205982.pdf?src-supplier=Onlinecomponents.com; ComponentLink4Description: https://datasheet.ciiva.com/30205/eng-cs-1654285-ampseal-sealed-nector-0911-30205982.pdf?src-supplier=Onlinecomponents.com; ComponentLink5URL: https://datasheet.ciiva.com/8004/1698943-8004021.pdf?src-supplier=Element14; ComponentLink5Description: https://datasheet.ciiva.com/8004/1698943-8004021.pdf?src-supplier=Element14; ComponentLink6URL: https://datasheet.ciiva.com/48697/001307260-da-01-en-anwendungsspezifikation-48697451.pdf?src-supplier=Conrad; ComponentLink6Description: https://datasheet.ciiva.com/48697/001307260-da-01-en-anwendungsspezifikation-48697451.pdf?src-supplier=Conrad
pins: 1, 2, 3, 4, 5, 6, 7, 8, 9, 10, 11, 12, 13, 14, 15, 16, 17, 18, 19, 20, 21, 22, 23
text: Цепь; Конт

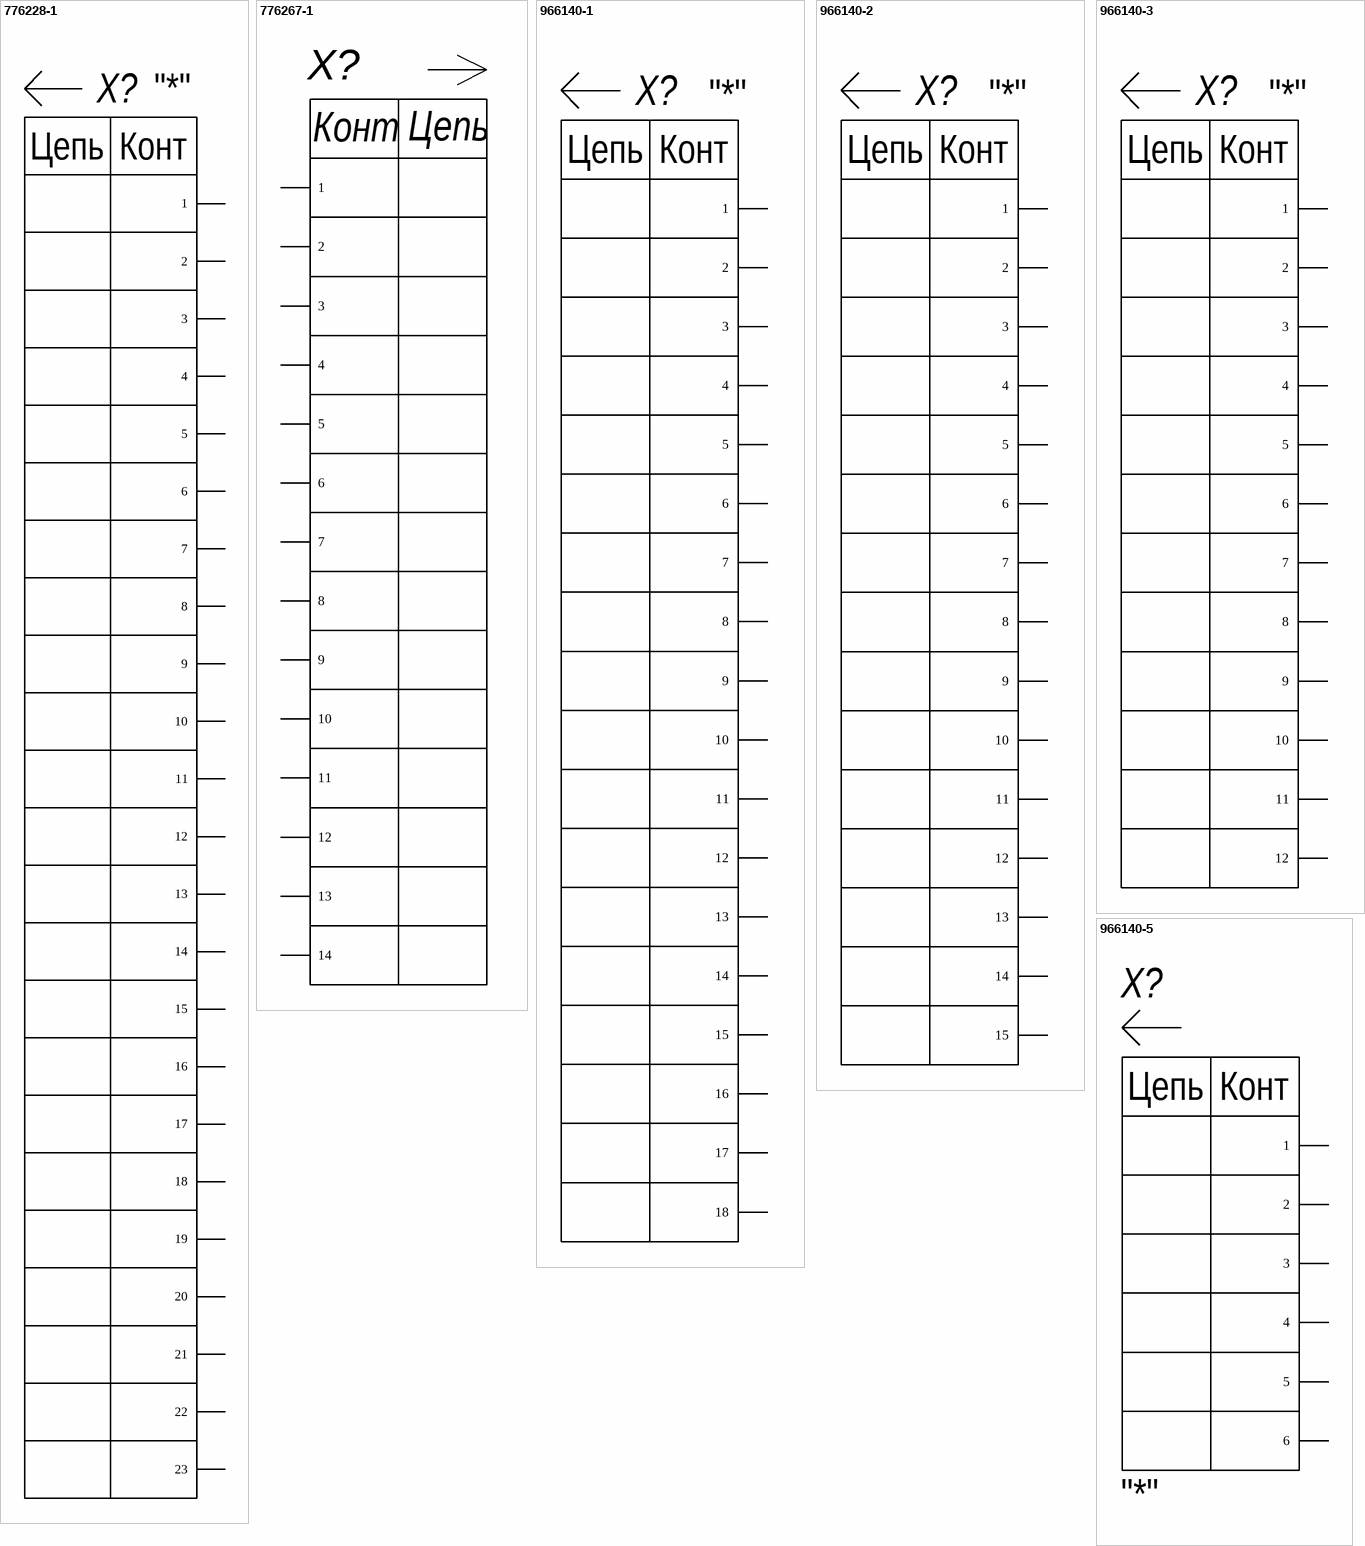
[diagram p2: symbols 776228-1 to 966140-5]

## 776228-1
designator X?  Marck-2: "*"  (hidden comment: 776228-1)
Conn Shrouded Header (4 Sides) M 23 POS 2mm Solder ST Top Entry Thru-Hole Automotive Loose; Manufacturer 1: TE Connectivity; Number of Terminals/Pins: 1; Number of Contacts: 23; Gender: Male; Current Rating: 17A; Circuit Application: Power; PCB Mount Alignment: Yes (With); PCB Mount Retention: Without; Shielding: Unshielded; Max Voltage Rating (AC): 250V; Connector System: Wire-to-Device; Primary Type: Rectangular; Pitch: 0.157inch; PCB Thickness: 0.062inch; Tab Thickness: 1.3mm; Case/Package: DIP-23 (+4MECH); Mount: THT; Type: Вилка; Value: 776228-1; Marck-1: *; Supplier 1: Farnell; Supplier Part Number 1: 2101997; Manufacturer Part Number 1: 776228-1; RoHS 1: Yes; Category: Headers and Wire Housings; Stock 1: 1446; Pricing 1: 1=14,00000, 10=12,41000, 25=10,82000, 100=9,86000, 250=9,22000, 500=9,04000 (EUR); Number of Pins: 1; Color: Black; Contact Plating: Tin; Contact Material: Brass; Housing Material: Thermoplastic; Contact Shape: Circular; Contact Finish - Mating: TIN; Insulation Material: PBT; Insulation Color: Black; Min Operating Temperature: -40°C; Max Operating Temperature: 221°C; Package Quantity: 1; Termination: Solder; Orientation: Straight; Series: Ampseal; Number of Rows: 3; Fastening Type: Ramp; Packaging: Bulk; Number of Positions: 23; Number of Ports: 1; Connector Type: Header; Number of Signal Positions: 23; Sealable: Yes (With); Contact Type: Male Pin; Voltage Rating (AC): 250V; Length: 60.8mm; Width: 1.264inch; Height: 34.25mm; Depth: 32.1mm; Row Spacing: 0.157inch; Radiation Hardening: No; RoHS Compliant: Yes; Lead Free: Lead Free; ELV: Compliant; Flammability Rating: UL94 V-0; ComponentLink1URL: https://datasheet.ciiva.com/11747/0900766b81013e1b-11747246.pdf?src-supplier=RSComponents; ComponentLink1Description: https://datasheet.ciiva.com/11747/0900766b81013e1b-11747246.pdf?src-supplier=RSComponents; ComponentLink2URL: https://datasheet.ciiva.com/7891/1600706-7891795.pdf?src-supplier=Element14; ComponentLink2Description: https://datasheet.ciiva.com/7891/1600706-7891795.pdf?src-supplier=Element14; ComponentLink3URL: https://datasheet.ciiva.com/16357/eng-cd-776228-c5-16357858.pdf?src-supplier=Future+Electronics; ComponentLink3Description: https://datasheet.ciiva.com/16357/eng-cd-776228-c5-16357858.pdf?src-supplier=Future+Electronics; ComponentLink4URL: https://datasheet.ciiva.com/6827/eng-cd-776228-c12-6827339.pdf?src-supplier=Digi-Key; ComponentLink4Description: https://datasheet.ciiva.com/6827/eng-cd-776228-c12-6827339.pdf?src-supplier=Digi-Key; ComponentLink5URL: https://datasheet.ciiva.com/48697/001307277-da-01-en-katalog-48697660.pdf?src-supplier=Conrad; ComponentLink5Description: https://datasheet.ciiva.com/48697/001307277-da-01-en-katalog-48697660.pdf?src-supplier=Conrad
footprint TE_776228-1
pins: 1, 2, 3, 4, 5, 6, 7, 8, 9, 10, 11, 12, 13, 14, 15, 16, 17, 18, 19, 20, 21, 22, 23
text: Цепь; Конт

## 776267-1
designator X?  (value not drawn)
AMPSEAL Series, 14 Way Panel Mount Plug Header, with Solder Termination; Manufacturer 1: TE Connectivity; Case/Package: DIP-14; Mount: THT; Type: Вилка; Value: 776267-1; Supplier 1: Farnell; Supplier Part Number 1: 2798126; Manufacturer Part Number 1: 776267-1; RoHS 1: Yes; Category: Connectors; Pricing 1: 1=8,25000, 10=7,64000, 25=7,40000, 100=7,15000, 250=6,91000, 500=6,77000 (EUR); ComponentLink1URL: https://datasheet.ciiva.com/6833/eng-cd-776267-b5-pdf-776267-c-drw-6833902.pdf?src-supplier=Digi-Key; ComponentLink1Description: https://datasheet.ciiva.com/6833/eng-cd-776267-b5-pdf-776267-c-drw-6833902.pdf?src-supplier=Digi-Key; ComponentLink2URL: https://datasheet.ciiva.com/11748/0900766b81013e1b-11748574.pdf?src-supplier=RSComponents; ComponentLink2Description: https://datasheet.ciiva.com/11748/0900766b81013e1b-11748574.pdf?src-supplier=RSComponents; ComponentLink3URL: https://datasheet.ciiva.com/30125/eng-cat-65481-0100-65-30125785.pdf?src-supplier=Onlinecomponents.com; ComponentLink3Description: https://datasheet.ciiva.com/30125/eng-cat-65481-0100-65-30125785.pdf?src-supplier=Onlinecomponents.com; ComponentLink4URL: https://datasheet.ciiva.com/48697/001307228-da-01-en-stiftwanne-90grad-mit-dichtung-776267-1-48697467.pdf?src-supplier=Conrad; ComponentLink4Description: https://datasheet.ciiva.com/48697/001307228-da-01-en-stiftwanne-90grad-mit-dichtung-776267-1-48697467.pdf?src-supplier=Conrad
footprint 776267-1
pins: 1 "Назначение вывода", 2 "Назначение вывода", 3 "Назначение вывода", 4 "Назначение вывода", 5 "Назначение вывода", 6 "Назначение вывода", 7 "Назначение вывода", 8 "Назначение вывода", 9 "Назначение вывода", 10 "Назначение вывода", 11 "Назначение вывода", 12 "Назначение вывода", 13 "Назначение вывода", 14 "Назначение вывода"
text: Конт; Цепь

## 966140-1
designator X?  Marck-2: "*"  (hidden comment: 966140-1)
Conn Timer Connector HDR 18 POS 5mm Solder RA Thru-Hole 18 Terminal 1 Port Tray; Manufacturer 1: TE Connectivity AMP; Number of Terminals/Pins: 18; Circuit Application: Signal; Sealable: No (Without); Gender: Male; Number of Ports: 1; PCB Mount Retention: Without; Shielding: Unshielded; Pitch: 3.5mm; Tab Thickness: 0.8mm; Tab Width: 2.8mm; Manufacturer Part Number 1: 966140-1; RoHS: Yes; Category: Headers and Wire Housings; Pricing 1: 1120=3,79637 (USD); Mount: THT; Contact Plating: Tin; Housing Material: Polyamide; Housing Color: Black; Color: Black; Contact Material: Bronze; Min Operating Temperature: -40°C; Max Operating Temperature: 212°C; Number of Contacts: 18; Termination: Solder; Orientation: Right Angle; Number of Rows: 3; Packaging: Tray; Package Quantity: 112; Number of Positions: 18; Number of Signal Positions: 18; PCB Mount Alignment: No (Without); Length: 46mm; Width: 0.791inch; Radiation Hardening: No; RoHS Compliant: Yes; ELV: Compliant; Flammability Rating: UL94 HB; ComponentLink1URL: https://datasheet.ciiva.com/30081/eng-cat-1307998-1-0705-074-30081833.pdf?src-supplier=Onlinecomponents.com; ComponentLink1Description: https://datasheet.ciiva.com/30081/eng-cat-1307998-1-0705-074-30081833.pdf?src-supplier=Onlinecomponents.com; Supplier 1: RSComponents; Supplier 2: Digi-Key; Supplier 3: Avnet; Supplier Part Number 1: 7183824; Supplier Part Number 2: 17-966140-1-ND; Supplier Part Number 3: 3-966140-1; Marck-1: *; Case/Package: DIP-18 (+MECH-2); Type: Вилка; Value: 966140-1
footprint TE_966140-1 (Conn Timer Connector HDR 18 POS 5mm Solder RA Thru-Hole 18 Terminal 1 Port Tray)
pins: 1, 2, 3, 4, 5, 6, 7, 8, 9, 10, 11, 12, 13, 14, 15, 16, 17, 18
text: Цепь; Конт

## 966140-2
designator X?  Marck-2: "*"  (hidden comment: 966140-2)
Conn Timer Connector HDR 15 POS 5mm Solder RA Thru-Hole 15 Terminal 1 Port Tray; Manufacturer 1: TE Connectivity; Manufacturer Part Number 1: 9-966140-2; Description 1: Conn Timer Connector HDR 15 POS 5mm Solder RA Thru-Hole 15 Terminal 1 Port Automotive Tray; Number of Terminals/Pins: 15; Circuit Application: Signal; Sealable: No (Without); Connector Type: Plug; Shielding: Unshielded; PCB Mount Retention: Without; Number of Ports: 1; Gender: Male; Pitch: 3.5mm; Row Spacing: 0.217inch; Tab Thickness: 0.8mm; Tab Width: 2.8mm; ComponentLink1URL: https://datasheet.ciiva.com/30081/eng-cat-1307998-1-0705-074-30081833.pdf?src-supplier=Onlinecomponents.com; ComponentLink1Description: https://datasheet.ciiva.com/30081/eng-cat-1307998-1-0705-074-30081833.pdf?src-supplier=Onlinecomponents.com; Marck-1: *; Supplier 1: RSComponents; Supplier Part Number 1: 1839047; RoHS: Yes; Category: Headers and Wire Housings; Stock 1: 1; Pricing 1: 140=6,60100 (USD); Mount: THT; Contact Plating: Tin; Color: Black; Housing Color: Black; Housing Material: Polyamide; Contact Material: Bronze,Tin; Min Operating Temperature: -40°C; Max Operating Temperature: 212°C; Number of Rows: 3; Termination: Solder; Number of Contacts: 15; Package Quantity: 112; Number of Positions: 15; Packaging: Tray; Orientation: Right Angle; Series: Junior Power Timer; Contact Type: Tab; Number of Signal Positions: 15; PCB Mount Alignment: No (Without); Contact Gender: Male; Length: 1.6142inch; Width: 0.791inch; Radiation Hardening: No; RoHS Compliant: Yes; ELV: Compliant; Flammability Rating: UL94 HB; Lead Free: Lead Free; REACH SVHC: No SVHC; ComponentLink2URL: https://datasheet.ciiva.com/23803/1521067-23803407.pdf?src-supplier=Newark; ComponentLink2Description: https://datasheet.ciiva.com/23803/1521067-23803407.pdf?src-supplier=Newark; ComponentLink3URL: https://datasheet.ciiva.com/8003/1521067-8003965.pdf?src-supplier=Element14; ComponentLink3Description: https://datasheet.ciiva.com/8003/1521067-8003965.pdf?src-supplier=Element14; ComponentLink4URL: https://datasheet.ciiva.com/30152/291ddetrolleractionshowdocdocidcatalogsection7f1307998-2-gad-amp-30152293.pdf?src-supplier=Onlinecomponents.com; ComponentLink4Description: https://datasheet.ciiva.com/30152/291ddetrolleractionshowdocdocidcatalogsection7f1307998-2-gad-amp-30152293.pdf?src-supplier=Onlinecomponents.com; ComponentLink5URL: https://datasheet.ciiva.com/731/eng-cd-966140-f6-731254.pdf?src-supplier=Digi-Key; ComponentLink5Description: https://datasheet.ciiva.com/731/eng-cd-966140-f6-731254.pdf?src-supplier=Digi-Key; Case/Package: DIP-15 (+MECH-2); Type: Вилка; Value: 966140-2
footprint TE_966140-2 (Conn Timer Connector HDR 15 POS 5mm Solder RA Thru-Hole 15 Terminal 1 Port Tray)
pins: 1, 2, 3, 4, 5, 6, 7, 8, 9, 10, 11, 12, 13, 14, 15
text: Цепь; Конт